# EAGLE library part ATMEGA328P-AU (library ATMEGA328P-AU)
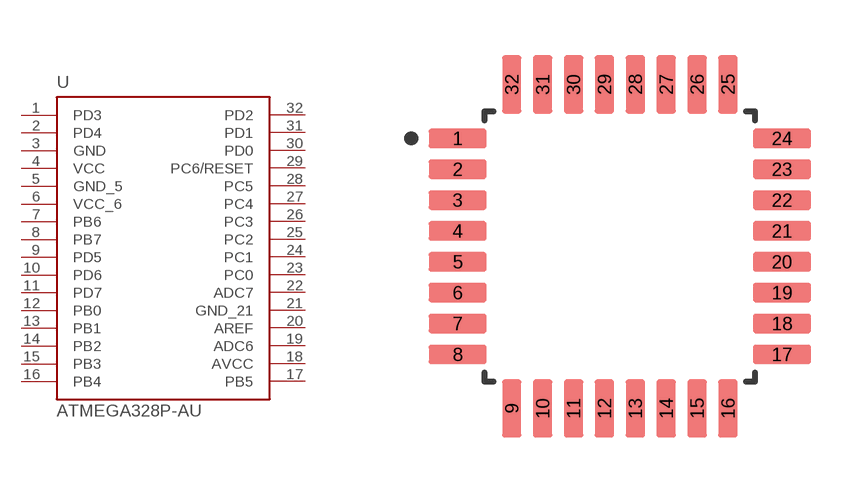
[diagram p0: symbol with the pads of C14877_TQFP-32_7x7; footprint C14877_TQFP-32_7x7]

Designator prefix U

## ATMEGA328P-AU  [C14877_TQFP-32_7x7]
1  PD3
2  PD4
3  GND
4  VCC
5  GND_5
6  VCC_6
7  PB6
8  PB7
9  PD5
10  PD6
11  PD7
12  PB0
13  PB1
14  PB2
15  PB3
16  PB4
17  PB5
18  AVCC
19  ADC6
20  AREF
21  GND_21
22  ADC7
23  PC0
24  PC1
25  PC2
26  PC3
27  PC4
28  PC5
29  PC6/RESET
30  PD0
31  PD1
32  PD2

## Footprint C14877_TQFP-32_7x7 (pad centres in mm)
ATMEGA328P-AU — Clean-Room IPC-7351B / JEDEC MS-026-ABA
smd 1.5 x 0.5: 1 -4.2,2.8; 2 -4.2,2; 3 -4.2,1.2; 4 -4.2,0.4; 5 -4.2,-0.4; 6 -4.2,-1.2; 7 -4.2,-2; 8 -4.2,-2.8; 17 4.2,-2.8; 18 4.2,-2; 19 4.2,-1.2; 20 4.2,-0.4; 21 4.2,0.4; 22 4.2,1.2; 23 4.2,2; 24 4.2,2.8
smd 0.5 x 1.5: 9 -2.8,-4.2; 10 -2,-4.2; 11 -1.2,-4.2; 12 -0.4,-4.2; 13 0.4,-4.2; 14 1.2,-4.2; 15 2,-4.2; 16 2.8,-4.2; 25 2.8,4.2; 26 2,4.2; 27 1.2,4.2; 28 0.4,4.2; 29 -0.4,4.2; 30 -1.2,4.2; 31 -2,4.2; 32 -2.8,4.2